# Altium schematic symbol library MyLibrary.SCHLIB: 89 symbols (part 1 of 3)
Pins are listed as number, name and electrical type; pins without a type are passive.

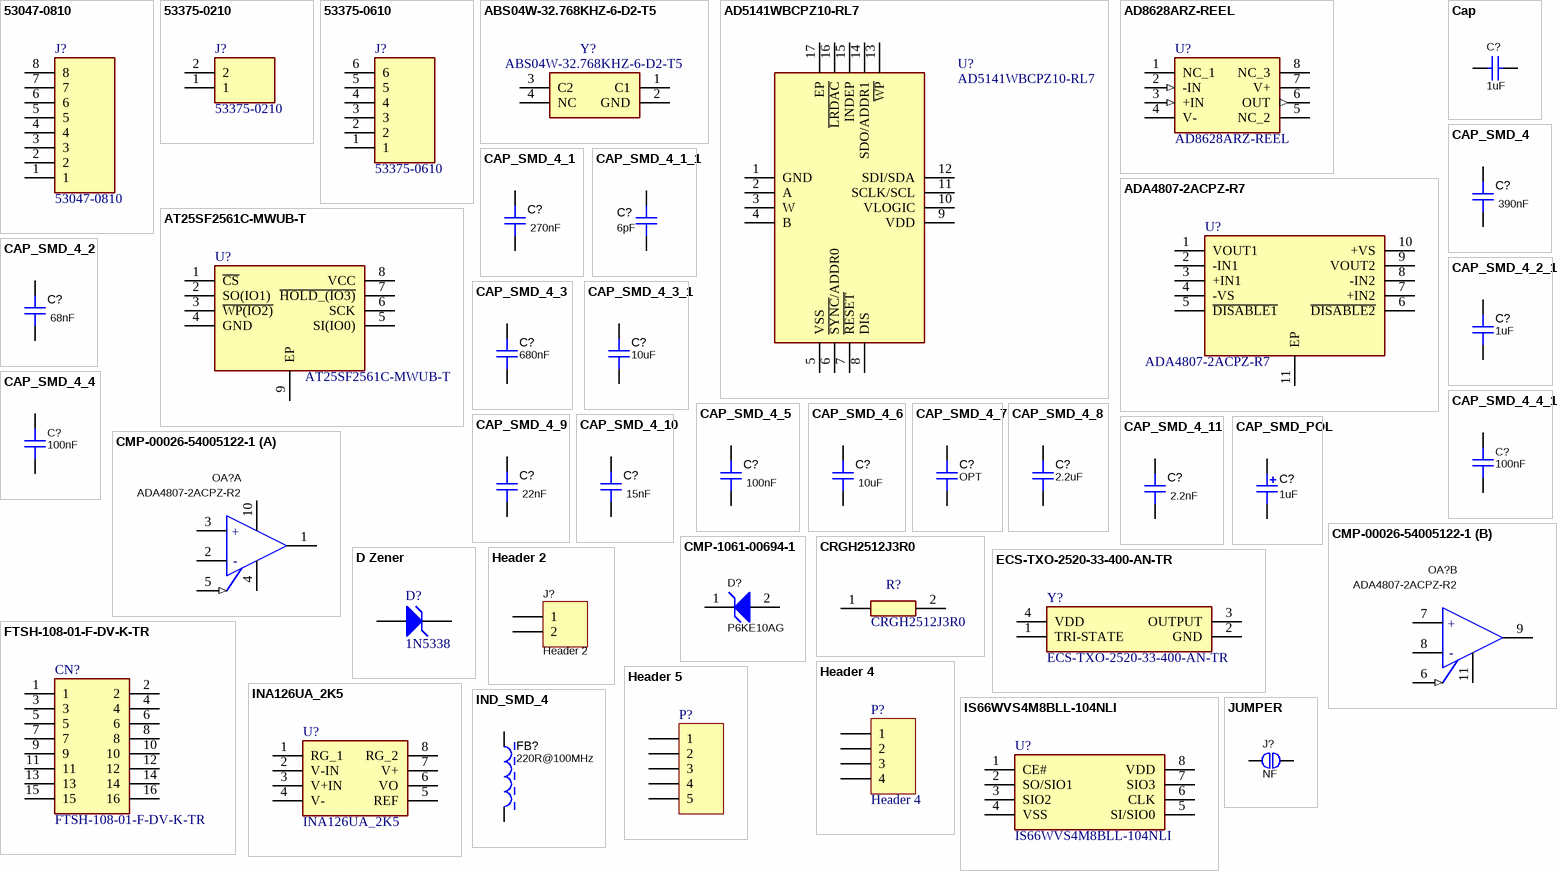
[diagram p0: symbols 53047-0810 to JUMPER]

## 53047-0810
designator J?
Connector; Manufacturer_Name: Molex; Datasheet Link: https://www.mouser.lu/datasheet/2/276/0530470810_PCB_HEADERS-170988.pdf; Height: 4.4mm; Manufacturer_Part_Number: 53047-0810; Mouser Part Number: 538-53047-0810; Mouser Price/Stock: https://www.mouser.co.uk/ProductDetail/Molex/53047-0810?qs=yVuyZxZd%2FtwixHNjj7O2xA%3D%3D
footprint 530470810
pins: 1, 2, 3, 4, 5, 6, 7, 8

## 53375-0210
designator J?
Connector; Manufacturer_Name: Molex; Datasheet Link: https://datasheet.datasheetarchive.com/originals/distributors/Datasheets_SAMA/bd59b54c805ced1a71062f6d650f6341.pdf; Manufacturer_Part_Number: 53375-0210; Mouser Part Number: 538-53375-0210; Mouser Price/Stock: https://www.mouser.co.uk/ProductDetail/Molex/53375-0210?qs=HP07ajSgg77sAYvtVhUSZg%3D%3D
footprint 53375-0210
pins: 1, 2

## 53375-0610
designator J?
Connector; Manufacturer_Name: Molex; Datasheet Link: http://www.molex.com/webdocs/datasheets/pdf/en-us//0533750610_PCB_HEADERS.pdf; Manufacturer_Part_Number: 53375-0610; Mouser Part Number: 538-53375-0610; Mouser Price/Stock: https://www.mouser.co.uk/ProductDetail/Molex/53375-0610?qs=3DzawVMofg%252BMF244WTWp8Q%3D%3D
footprint 53375-0610
pins: 1, 2, 3, 4, 5, 6

## ABS04W-32.768KHZ-6-D2-T5
designator Y?
Crystal or Oscillator; Manufacturer_Name: ABRACON; Datasheet Link: https://abracon.com/datasheets/ABS04W.pdf; Height: 0.35mm; Manufacturer_Part_Number: ABS04W-32.768KHZ-6-D2-T5; Mouser Part Number: 815-04W-32.768-6-D2T; Mouser Price/Stock: https://www.mouser.co.uk/ProductDetail/ABRACON/ABS04W-32.768KHZ-6-D2-T5?qs=lc2O%252BfHJPVZbxXtU7CitfQ%3D%3D; Arrow Part Number: ABS04W-32.768KHZ-6-D2-T5; Arrow Price/Stock: https://www.arrow.com/en/products/abs04w-32.768khz-6-d2-t5/abracon?region=nac
footprint ABS04W32768KHZ6D2T5
pins: 1 C1, 2 GND, 3 C2, 4 NC

## AD5141WBCPZ10-RL7
designator U?
Integrated Circuit; Manufacturer_Name: Analog Devices; Datasheet Link: https://www.analog.com/AD5141/datasheet; Height: 0.8mm; Manufacturer_Part_Number: AD5141WBCPZ10-RL7; Mouser Part Number: 584-AD5141WBCPZ10RL7; Mouser Price/Stock: https://www.mouser.co.uk/ProductDetail/Analog-Devices/AD5141WBCPZ10-RL7?qs=gt1LBUVyoHm1H52beii%2F4w%3D%3D; Arrow Part Number: AD5141WBCPZ10-RL7; Arrow Price/Stock: null?region=nac
footprint QFN50P300X300X80-17N-D
pins: 1 GND, 2 A, 3 W, 4 B, 5 VSS, 6 ~{SYNC}/ADDR0, 7 ~{RESET}, 8 DIS, 9 VDD, 10 VLOGIC, 11 SCLK/SCL, 12 SDI/SDA, 13 ~{WP}, 14 SDO/ADDR1, 15 INDEP, 16 ~{LRDAC}, 17 EP

## AD8628ARZ-REEL
designator U?
Integrated Circuit; Manufacturer_Name: Analog Devices; Datasheet Link: http://www.analog.com/media/en/technical-documentation/data-sheets/AD8628_8629_8630.pdf; Height: 1.75mm; Manufacturer_Part_Number: AD8628ARZ-REEL; Mouser Part Number: 584-AD8628ARZ-R; Mouser Price/Stock: https://www.mouser.co.uk/ProductDetail/Analog-Devices/AD8628ARZ-REEL?qs=%2FtpEQrCGXCzyQnz5nEY4Rg%3D%3D; Arrow Part Number: AD8628ARZ-REEL; Arrow Price/Stock: https://www.arrow.com/en/products/ad8628arz-reel/analog-devices?region=nac
footprint SOIC127P600X175-8N
pins: 1 NC_1, 2 -IN (in), 3 +IN (in), 4 V-, 5 NC_2, 6 OUT (out), 7 V+, 8 NC_3

## ADA4807-2ACPZ-R7
designator U?
Integrated Circuit; Manufacturer_Name: Analog Devices; Datasheet Link: http://www.analog.com/media/en/technical-documentation/data-sheets/ADA4807-1_4807-2_4807-4.pdf; Height: 0.8mm; Manufacturer_Part_Number: ADA4807-2ACPZ-R7; Mouser Part Number: 584-ADA4807-2ACPZ-R7; Mouser Price/Stock: https://www.mouser.co.uk/ProductDetail/Analog-Devices/ADA4807-2ACPZ-R7?qs=pDCvJ8VTjveD%2FcRkuOWedw%3D%3D; Arrow Part Number: ADA4807-2ACPZ-R7; Arrow Price/Stock: https://www.arrow.com/en/products/ada4807-2acpz-r7/analog-devices?utm_currency=USD&region=nac
footprint SON50P300X300X80-11N-D
pins: 1 VOUT1, 2 -IN1, 3 +IN1, 4 -VS, 5 ~{DISABLE1}, 6 ~{DISABLE2}, 7 +IN2, 8 -IN2, 9 VOUT2, 10 +VS, 11 EP

## AT25SF2561C-MWUB-T
designator U?
Integrated Circuit; Manufacturer_Name: Renesas Electronics; Datasheet Link: https://www.renesas.com/us/en/products/memory-logic/non-volatile-memory/spi-nor-flash/at25sf2561c-256mbit-3v-spi-serial-flash-memory-single-dual-quad-io-qpi-and-dtr-support; Height: 0.8mm; Manufacturer_Part_Number: AT25SF2561C-MWUB-T
footprint SON127P800X600X80-9N-D
pins: 1 ~{CS}, 2 SO(IO1), 3 ~{WP(IO2)}, 4 GND, 5 SI(IO0), 6 SCK, 7 ~{HOLD_(IO3)}, 8 VCC, 9 EP

## Cap
designator C?, comment 1uF
Capacitor SMD 1005mm (0402mil) 1uF 50V 10% X5R; Manufacturer 1: Murata; Manufacturer Part Number 1: GRM155R61H105KE05D; Point: U?_PIN?_PIN?; Power Supply Line: 3V3; Dielectric Material: Ceramic; Value: 1uF; Capacitance: 1uF; Category: Capacitor; ComponentLink1Description: Manufacturer 1 Product Page; ComponentLink1URL: https://www.murata.com/en-us/products/productdetail?partno=GRM155R61H105KE05%23; ComponentLink2Description: Manufacturer 1 Product Datasheet 1; ComponentLink2URL: https://www.murata.com/en-us/api/pdfdownloadapi?cate=luCeramicCapacitorsSMD&partno=GRM155R61H105KE05%23; ComponentLink3Description: Supplier 1 Product Page; ComponentLink3URL: https://www.mouser.com/ProductDetail/Murata-Electronics/GRM155R61H105KE05D?qs=sGAEpiMZZMvsSlwiRhF8qtsGU%2FCnaNeQmZAWh6IJQQpqK6b7Qpvy8Q%3D%3D&_gl=1*1tvwjb5*_ga*NDA1NjcxNTEzLjE2NzMzMjM1MDc.*_ga_15W4STQT4T*MTY5MzY4NDY0OC43LjEuMTY5MzY4NjQwNy4wLjAuMA..*_ga_1KQLCYKRX3*MTY5MzY4NDY0OC44LjEuMTY5MzY4NjQwNy41Mi4wLjA.; ComponentLink4Description: Supplier 1 Product Datasheet 1; ComponentLink4URL: https://www.mouser.com/datasheet/2/281/1/GRM155R61H105KE05_01A-1983895.pdf; Manufacturer 1 Product Datasheet 1: https://www.murata.com/en-us/api/pdfdownloadapi?cate=luCeramicCapacitorsSMD&partno=GRM155R61H105KE05%23; Manufacturer 1 Product Page: https://www.murata.com/en-us/products/productdetail?partno=GRM155R61H105KE05%23; Manufacturer: Murata; Manufacturer Part Number: GRM155R61H105KE05D; Manufacturer Product Datasheet: https://www.murata.com/en-us/api/pdfdownloadapi?cate=luCeramicCapacitorsSMD&partno=GRM155R61H105KE05%23; Manufacturer Product Page: https://www.murata.com/en-us/products/productdetail?partno=GRM155R61H105KE05%23; Dielectric: X5R; Supplier 1: Mouser; Supplier Part Number 1: 81-GRM155R61H105KE5D; Description PT-BR: Description PT-BR
footprint 0603 (Chip Inductor, Body 0.6x0.3mm, IPC High Density)
simulation model CAP (Capacitor)
signal-integrity model Cap
footprint 6-0805_L (Chip Resistor, Body 2.0x1.2mm, IPC High Density)
footprint CAPC1608N
footprint CAPC1005N
pins: 1, 2

## CAP_SMD_4
designator C?, comment value 390nF  (hidden comment: 390 nF 5%)
Point: U?_PIN?_PIN?; AAAA_DESCRIPTION: k; Category: Capacitor; Height: k; ComponentLink1Description: Manufacturer 1 Product Page; ComponentLink2Description: Manufacturer 1 Product Datasheet 1; ComponentLink3Description: Supplier 1 Product Page; ComponentLink4Description: Supplier 1 Product Datasheet 1; Supplier 1: Mouser; Capacitance: 390nF; Termination: SMD/SMT; Supplier 2: Mouser; BBBB_LINK: k; ComponentLink5Description: Manufacturer 2 Product Page; ComponentLink6Description: Manufacturer 2 Product Datasheet 1; ComponentLink7Description: Supplier 2 Product Page; ComponentLink8Description: Supplier 2 Product Datasheet 1; Description - Layout: k; Description - Manufacturer: k; Description - Schematic: k; Description - Short: k; Manufacturer 1 Product Datasheet 1: https://www.murata.com/en-us/api/pdfdownloadapi?cate=luCeramicCapacitorsSMD&partno=GCM155R71H104KE02%23; Manufacturer 1 Product Page: https://www.murata.com/en-us/products/productdetail?partno=GCM155R71H104KE02%23; Manufacturer 2 Product Datasheet 1: https://product.tdk.com/system/files/dam/doc/product/capacitor/ceramic/mlcc/catalog/mlcc_automotive_general_en.pdf; Manufacturer 2 Product Page: https://product.tdk.com/en/search/capacitor/ceramic/mlcc/info?part_no=CGA2B3X7R1H104K050BB; Manufacturer Product Datasheet: https://www.murata.com/en-us/api/pdfdownloadapi?cate=luCeramicCapacitorsSMD&partno=GCM155R71H104KE02%23; Manufacturer Product Page: https://www.murata.com/en-us/products/productdetail?partno=GCM155R71H104KE02%23
simulation model CAP (Semiconductor Capacitor)
signal-integrity model Cap Semi
footprint CAPC1608M (Chip Capacitor, Body 1.6x0.8mm, IPC Low Density)
footprint CAPC1005M (Chip Capacitor, Body 1.0x0.5mm, IPC Low Density)
footprint CAPC1210M (Chip Capacitor, Body 1.2x1.0mm, IPC Low Density)
footprint CAPC2012M (Chip Capacitor, Body 2.0x1.3mm, IPC Low Density)
footprint CAPC3216M (Chip Capacitor, Body 3.2x1.6mm, IPC Low Density)
footprint CAPC3225M (Chip Capacitor, Body 3.2x2.5mm, IPC Low Density)
footprint CAPC4532M (Chip Capacitor, Body 4.5x3.2mm, IPC Low Density)
footprint CAPC4564M (Chip Capacitor, Body 4.5x6.4mm, IPC Low Density)
footprint CAPC5750M (Chip Capacitor, Body 5.7x5.0mm, IPC Low Density)
footprint CAPC1005N (Chip Capacitor, Body 1.0x0.5mm, IPC Medium Density)
footprint CAPCS6153X37 (Chip Capacitor Stacked, Body 6.1 x 5.3 mm (LxW typ) 3.7mm max.)
pins: 1, 2

## CAP_SMD_4_1
designator C?, comment value 270nF  (hidden comment: 270 nF 5%)
Point: U?_PIN?_PIN?; AAAA_DESCRIPTION: k; Category: Capacitor; Height: k; ComponentLink1Description: Manufacturer 1 Product Page; ComponentLink2Description: Manufacturer 1 Product Datasheet 1; ComponentLink3Description: Supplier 1 Product Page; ComponentLink4Description: Supplier 1 Product Datasheet 1; Supplier 1: Mouser; Capacitance: 270nF; Termination: SMD/SMT; Supplier 2: Mouser; BBBB_LINK: k; ComponentLink5Description: Manufacturer 2 Product Page; ComponentLink6Description: Manufacturer 2 Product Datasheet 1; ComponentLink7Description: Supplier 2 Product Page; ComponentLink8Description: Supplier 2 Product Datasheet 1; Description - Layout: k; Description - Manufacturer: k; Description - Schematic: k; Description - Short: k; Manufacturer 1 Product Datasheet 1: https://www.murata.com/en-us/api/pdfdownloadapi?cate=luCeramicCapacitorsSMD&partno=GCM155R71H104KE02%23; Manufacturer 1 Product Page: https://www.murata.com/en-us/products/productdetail?partno=GCM155R71H104KE02%23; Manufacturer 2 Product Datasheet 1: https://product.tdk.com/system/files/dam/doc/product/capacitor/ceramic/mlcc/catalog/mlcc_automotive_general_en.pdf; Manufacturer 2 Product Page: https://product.tdk.com/en/search/capacitor/ceramic/mlcc/info?part_no=CGA2B3X7R1H104K050BB; Manufacturer Product Datasheet: https://www.murata.com/en-us/api/pdfdownloadapi?cate=luCeramicCapacitorsSMD&partno=GCM155R71H104KE02%23; Manufacturer Product Page: https://www.murata.com/en-us/products/productdetail?partno=GCM155R71H104KE02%23
simulation model CAP (Semiconductor Capacitor)
signal-integrity model Cap Semi
footprint CAPC1608M (Chip Capacitor, Body 1.6x0.8mm, IPC Low Density)
footprint CAPC1005M (Chip Capacitor, Body 1.0x0.5mm, IPC Low Density)
footprint CAPC1210M (Chip Capacitor, Body 1.2x1.0mm, IPC Low Density)
footprint CAPC2012M (Chip Capacitor, Body 2.0x1.3mm, IPC Low Density)
footprint CAPC3216M (Chip Capacitor, Body 3.2x1.6mm, IPC Low Density)
footprint CAPC3225M (Chip Capacitor, Body 3.2x2.5mm, IPC Low Density)
footprint CAPC4532M (Chip Capacitor, Body 4.5x3.2mm, IPC Low Density)
footprint CAPC4564M (Chip Capacitor, Body 4.5x6.4mm, IPC Low Density)
footprint CAPC5750M (Chip Capacitor, Body 5.7x5.0mm, IPC Low Density)
footprint CAPC1005N (Chip Capacitor, Body 1.0x0.5mm, IPC Medium Density)
footprint CAPCS6153X37 (Chip Capacitor Stacked, Body 6.1 x 5.3 mm (LxW typ) 3.7mm max.)
pins: 1, 2

## CAP_SMD_4_1_1
designator C?, comment value 6pF  (hidden comment: Capacitor SMD 1005mm (0402mil) 6pF 50V 0.5pF C0G)
Manufacturer: Murata; Manufacturer Part Number: GCM1555C1H6R0DA16D; Point: U?_PIN?_PIN?; Description - Short: k; Dielectric Material: Ceramic; Category: Capacitor; Height: k; ComponentLink1Description: Manufacturer 1 Product Page; ComponentLink1URL: k; ComponentLink2Description: Manufacturer 1 Product Datasheet 1; ComponentLink2URL: k; ComponentLink3Description: Supplier 1 Product Page; ComponentLink3URL: k; ComponentLink4Description: Supplier 1 Product Datasheet 1; ComponentLink4URL: k; AAAA_DESCRIPTION: K; BBBB_LINK: K; Description - Layout: k; Description - Schematic: k; Manufacturer Product Datasheet: k; Manufacturer Product Page: k; Description - Manufacturer: k; Manufacturer 1 Product Datasheet 1: k; Manufacturer 1 Product Page: k; Manufacturer 2 Product Datasheet 1: k; Manufacturer 2 Product Page: k; Supplier 1: Mouser; Supplier Part Number 1: 81-GCM1555C1H6R0DA6D; Manufacturer 1: Murata; Manufacturer Part Number 1: GCM1555C1H6R0DA16D; Case Code (Imperial): 0402; Case Code (Metric): 1005; Min Operating Temperature: -55°C; Max Operating Temperature: 125°C; Capacitance: 6pF; Dielectric: C0G; Voltage Rating (DC): 50V; Termination: SMD/SMT; Tolerance: 0.5 pF; ComponentLink5URL: k; ComponentLink5Description: Manufacturer 2 Product Page; ComponentLink6URL: k; ComponentLink6Description: Manufacturer 2 Product Datasheet 1; ComponentLink7URL: k; ComponentLink7Description: Supplier 2 Product Page; ComponentLink8URL: k; ComponentLink8Description: Supplier 2 Product Datasheet 1; Manufacturer 2: k; Manufacturer Part Number 2: k; Supplier 2: k; Supplier Part Number 2: k
simulation model CAP (Semiconductor Capacitor)
signal-integrity model Cap Semi
footprint CAPC1608M (Chip Capacitor, Body 1.6x0.8mm, IPC Low Density)
footprint CAPC1005M (Chip Capacitor, Body 1.0x0.5mm, IPC Low Density)
footprint CAPC1210M (Chip Capacitor, Body 1.2x1.0mm, IPC Low Density)
footprint CAPC2012M (Chip Capacitor, Body 2.0x1.3mm, IPC Low Density)
footprint CAPC3216M (Chip Capacitor, Body 3.2x1.6mm, IPC Low Density)
footprint CAPC3225M (Chip Capacitor, Body 3.2x2.5mm, IPC Low Density)
footprint CAPC4532M (Chip Capacitor, Body 4.5x3.2mm, IPC Low Density)
footprint CAPC4564M (Chip Capacitor, Body 4.5x6.4mm, IPC Low Density)
footprint CAPC5750M (Chip Capacitor, Body 5.7x5.0mm, IPC Low Density)
footprint CAPC1005N (Chip Capacitor, Body 1.0x0.5mm, IPC Medium Density)
footprint CAPCS6153X37 (Chip Capacitor Stacked, Body 6.1 x 5.3 mm (LxW typ) 3.7mm max.)
pins: 1, 2

## CAP_SMD_4_2
designator C?, comment value 68nF  (hidden comment: 68 nF 5%)
Point: U?_PIN?_PIN?; AAAA_DESCRIPTION: k; Category: Capacitor; Height: k; ComponentLink1Description: Manufacturer 1 Product Page; ComponentLink2Description: Manufacturer 1 Product Datasheet 1; ComponentLink3Description: Supplier 1 Product Page; ComponentLink4Description: Supplier 1 Product Datasheet 1; Supplier 1: Mouser; Capacitance: 68nF; Termination: SMD/SMT; Supplier 2: Mouser; BBBB_LINK: k; ComponentLink5Description: Manufacturer 2 Product Page; ComponentLink6Description: Manufacturer 2 Product Datasheet 1; ComponentLink7Description: Supplier 2 Product Page; ComponentLink8Description: Supplier 2 Product Datasheet 1; Description - Layout: k; Description - Manufacturer: k; Description - Schematic: k; Description - Short: k; Manufacturer 1 Product Datasheet 1: https://www.murata.com/en-us/api/pdfdownloadapi?cate=luCeramicCapacitorsSMD&partno=GCM155R71H104KE02%23; Manufacturer 1 Product Page: https://www.murata.com/en-us/products/productdetail?partno=GCM155R71H104KE02%23; Manufacturer 2 Product Datasheet 1: https://product.tdk.com/system/files/dam/doc/product/capacitor/ceramic/mlcc/catalog/mlcc_automotive_general_en.pdf; Manufacturer 2 Product Page: https://product.tdk.com/en/search/capacitor/ceramic/mlcc/info?part_no=CGA2B3X7R1H104K050BB; Manufacturer Product Datasheet: https://www.murata.com/en-us/api/pdfdownloadapi?cate=luCeramicCapacitorsSMD&partno=GCM155R71H104KE02%23; Manufacturer Product Page: https://www.murata.com/en-us/products/productdetail?partno=GCM155R71H104KE02%23
simulation model CAP (Semiconductor Capacitor)
signal-integrity model Cap Semi
footprint CAPC1608M (Chip Capacitor, Body 1.6x0.8mm, IPC Low Density)
footprint CAPC1005M (Chip Capacitor, Body 1.0x0.5mm, IPC Low Density)
footprint CAPC1210M (Chip Capacitor, Body 1.2x1.0mm, IPC Low Density)
footprint CAPC2012M (Chip Capacitor, Body 2.0x1.3mm, IPC Low Density)
footprint CAPC3216M (Chip Capacitor, Body 3.2x1.6mm, IPC Low Density)
footprint CAPC3225M (Chip Capacitor, Body 3.2x2.5mm, IPC Low Density)
footprint CAPC4532M (Chip Capacitor, Body 4.5x3.2mm, IPC Low Density)
footprint CAPC4564M (Chip Capacitor, Body 4.5x6.4mm, IPC Low Density)
footprint CAPC5750M (Chip Capacitor, Body 5.7x5.0mm, IPC Low Density)
footprint CAPC1005N (Chip Capacitor, Body 1.0x0.5mm, IPC Medium Density)
footprint CAPCS6153X37 (Chip Capacitor Stacked, Body 6.1 x 5.3 mm (LxW typ) 3.7mm max.)
pins: 1, 2

## CAP_SMD_4_2_1
designator C?, comment value 1uF  (hidden comment: Capacitor SMD 1608mm (0603mil) 1uF 50V 10% X7R)
Manufacturer: KYOCERA AVX; Manufacturer Part Number: 06035C105KAT2A; Point: U?_PIN?_PIN?; Description - Short: k; Dielectric Material: Ceramic; Category: Capacitor; Height: k; ComponentLink1Description: Manufacturer 1 Product Page; ComponentLink1URL: k; ComponentLink2Description: Manufacturer 1 Product Datasheet 1; ComponentLink2URL: k; ComponentLink3Description: Supplier 1 Product Page; ComponentLink3URL: k; ComponentLink4Description: Supplier 1 Product Datasheet 1; ComponentLink4URL: k; AAAA_DESCRIPTION: k; BBBB_LINK: k; Description - Layout: k; Description - Schematic: k; Manufacturer Product Datasheet: k; Manufacturer Product Page: k; Description - Manufacturer: k; Manufacturer 1 Product Datasheet 1: k; Manufacturer 1 Product Page: k; Manufacturer 2 Product Datasheet 1: k; Manufacturer 2 Product Page: k; Supplier 1: Mouser; Supplier Part Number 1: 581-06035C105KAT2A; Manufacturer 1: KYOCERA AVX; Manufacturer Part Number 1: 06035C105KAT2A; Case Code (Metric): 1608; Case Code (Imperial): 0603; Min Operating Temperature: -55°C; Max Operating Temperature: 125°C; Capacitance: 1uF; Voltage Rating (DC): 50V; Manufacturer 2: k; Termination: SMD/SMT; ComponentLink5Description: Manufacturer 2 Product Page; ComponentLink5URL: k; ComponentLink6Description: Manufacturer 2 Product Datasheet 1; ComponentLink6URL: k; ComponentLink7Description: Supplier 2 Product Page; ComponentLink7URL: k; ComponentLink8Description: Supplier 2 Product Datasheet 1; ComponentLink8URL: k; Manufacturer Part Number 2: k; Supplier 2: k; Supplier Part Number 2: k; Tolerance: 10%; Dielectric: X7R
simulation model CAP (Semiconductor Capacitor)
signal-integrity model Cap Semi
footprint CAPC1608M (Chip Capacitor, Body 1.6x0.8mm, IPC Low Density)
footprint CAPC1005M (Chip Capacitor, Body 1.0x0.5mm, IPC Low Density)
footprint CAPC1210M (Chip Capacitor, Body 1.2x1.0mm, IPC Low Density)
footprint CAPC2012M (Chip Capacitor, Body 2.0x1.3mm, IPC Low Density)
footprint CAPC3216M (Chip Capacitor, Body 3.2x1.6mm, IPC Low Density)
footprint CAPC3225M (Chip Capacitor, Body 3.2x2.5mm, IPC Low Density)
footprint CAPC4532M (Chip Capacitor, Body 4.5x3.2mm, IPC Low Density)
footprint CAPC4564M (Chip Capacitor, Body 4.5x6.4mm, IPC Low Density)
footprint CAPC5750M (Chip Capacitor, Body 5.7x5.0mm, IPC Low Density)
footprint CAPC1005N (Chip Capacitor, Body 1.0x0.5mm, IPC Medium Density)
pins: 1, 2

## CAP_SMD_4_3
designator C?, comment value 680nF  (hidden comment: 680 nF 5%)
Point: U?_PIN?_PIN?; AAAA_DESCRIPTION: k; Category: Capacitor; Height: k; ComponentLink1Description: Manufacturer 1 Product Page; ComponentLink2Description: Manufacturer 1 Product Datasheet 1; ComponentLink3Description: Supplier 1 Product Page; ComponentLink4Description: Supplier 1 Product Datasheet 1; Supplier 1: Mouser; Capacitance: 680nF; Termination: SMD/SMT; Supplier 2: Mouser; BBBB_LINK: k; ComponentLink5Description: Manufacturer 2 Product Page; ComponentLink6Description: Manufacturer 2 Product Datasheet 1; ComponentLink7Description: Supplier 2 Product Page; ComponentLink8Description: Supplier 2 Product Datasheet 1; Description - Layout: k; Description - Manufacturer: k; Description - Schematic: k; Description - Short: k; Manufacturer 1 Product Datasheet 1: https://www.murata.com/en-us/api/pdfdownloadapi?cate=luCeramicCapacitorsSMD&partno=GCM155R71H104KE02%23; Manufacturer 1 Product Page: https://www.murata.com/en-us/products/productdetail?partno=GCM155R71H104KE02%23; Manufacturer 2 Product Datasheet 1: https://product.tdk.com/system/files/dam/doc/product/capacitor/ceramic/mlcc/catalog/mlcc_automotive_general_en.pdf; Manufacturer 2 Product Page: https://product.tdk.com/en/search/capacitor/ceramic/mlcc/info?part_no=CGA2B3X7R1H104K050BB; Manufacturer Product Datasheet: https://www.murata.com/en-us/api/pdfdownloadapi?cate=luCeramicCapacitorsSMD&partno=GCM155R71H104KE02%23; Manufacturer Product Page: https://www.murata.com/en-us/products/productdetail?partno=GCM155R71H104KE02%23
simulation model CAP (Semiconductor Capacitor)
signal-integrity model Cap Semi
footprint CAPC1608M (Chip Capacitor, Body 1.6x0.8mm, IPC Low Density)
footprint CAPC1005M (Chip Capacitor, Body 1.0x0.5mm, IPC Low Density)
footprint CAPC1210M (Chip Capacitor, Body 1.2x1.0mm, IPC Low Density)
footprint CAPC2012M (Chip Capacitor, Body 2.0x1.3mm, IPC Low Density)
footprint CAPC3216M (Chip Capacitor, Body 3.2x1.6mm, IPC Low Density)
footprint CAPC3225M (Chip Capacitor, Body 3.2x2.5mm, IPC Low Density)
footprint CAPC4532M (Chip Capacitor, Body 4.5x3.2mm, IPC Low Density)
footprint CAPC4564M (Chip Capacitor, Body 4.5x6.4mm, IPC Low Density)
footprint CAPC5750M (Chip Capacitor, Body 5.7x5.0mm, IPC Low Density)
footprint CAPC1005N (Chip Capacitor, Body 1.0x0.5mm, IPC Medium Density)
footprint CAPCS6153X37 (Chip Capacitor Stacked, Body 6.1 x 5.3 mm (LxW typ) 3.7mm max.)
pins: 1, 2

## CAP_SMD_4_3_1
designator C?, comment value 10uF  (hidden comment: Capacitor SMD 2012mm (0805mil) 10uF 25V 10% X7R)
Manufacturer 1: Murata; Manufacturer Part Number 1: GRM21BZ71E106KE15K; Point: U?_PIN?_PIN?; AAAA_DESCRIPTION: k; Dielectric Material: Ceramic; Category: Capacitor; Height: k; ComponentLink1Description: Manufacturer 1 Product Page; ComponentLink1URL: k; ComponentLink2Description: Manufacturer 1 Product Datasheet 1; ComponentLink2URL: k; ComponentLink3Description: Supplier 1 Product Page; ComponentLink3URL: k; ComponentLink4Description: Supplier 1 Product Datasheet 1; ComponentLink4URL: k; Supplier 1: Mouser; Supplier Part Number 1: 81-GRM21BZ71E106KE5K; Capacitance: 10uF; Manufacturer: Murata; Manufacturer Part Number: GRM21BZ71E106KE15K; BBBB_LINK: k; ComponentLink5Description: Manufacturer 2 Product Page; ComponentLink6Description: Manufacturer 2 Product Datasheet 1; ComponentLink7Description: Supplier 2 Product Page; ComponentLink8Description: Supplier 2 Product Datasheet 1; ComponentLink5URL: k; ComponentLink6URL: k; ComponentLink7URL: k; ComponentLink8URL: k; Case Code (Imperial): 0805; Case Code (Metric): 2012; Description - Layout: k; Description - Manufacturer: k; Description - Schematic: k; Description - Short: k; Dielectric: X7R; Manufacturer 1 Product Datasheet 1: k; Manufacturer 1 Product Page: k; Manufacturer 2: k; Manufacturer 2 Product Datasheet 1: k; Manufacturer 2 Product Page: k; Manufacturer Part Number 2: k; Manufacturer Product Datasheet: k; Manufacturer Product Page: k; Max Operating Temperature: 125°C; Min Operating Temperature: -55°C; Supplier 2: k; Supplier Part Number 2: k; Termination: SMD/SMT; Tolerance: 10%; Voltage Rating (DC): 25V
simulation model CAP (Semiconductor Capacitor)
signal-integrity model Cap Semi
footprint CAPC1608M (Chip Capacitor, Body 1.6x0.8mm, IPC Low Density)
footprint CAPC1005M (Chip Capacitor, Body 1.0x0.5mm, IPC Low Density)
footprint CAPC1210M (Chip Capacitor, Body 1.2x1.0mm, IPC Low Density)
footprint CAPC2012M (Chip Capacitor, Body 2.0x1.3mm, IPC Low Density)
footprint CAPC3216M (Chip Capacitor, Body 3.2x1.6mm, IPC Low Density)
footprint CAPC3225M (Chip Capacitor, Body 3.2x2.5mm, IPC Low Density)
footprint CAPC4532M (Chip Capacitor, Body 4.5x3.2mm, IPC Low Density)
footprint CAPC4564M (Chip Capacitor, Body 4.5x6.4mm, IPC Low Density)
footprint CAPC5750M (Chip Capacitor, Body 5.7x5.0mm, IPC Low Density)
pins: 1, 2

## CAP_SMD_4_4
designator C?, comment value 100nF  (hidden comment: Capacitor SMD 2012mm (0805mil) 100nF 50V 10% X7R)
Manufacturer 1: Murata; Manufacturer Part Number 1: C0805C104K5RAC7411; Manufacturer: Kemet; Point: U?_PIN?_PIN?; AAAA_DESCRIPTION: k; Dielectric Material: Ceramic; Category: Capacitor; Height: k; ComponentLink1Description: Manufacturer 1 Product Page; ComponentLink1URL: k; ComponentLink2Description: Manufacturer 1 Product Datasheet 1; ComponentLink2URL: k; ComponentLink3Description: Supplier 1 Product Page; ComponentLink3URL: k; ComponentLink4Description: Supplier 1 Product Datasheet 1; ComponentLink4URL: k; Supplier 1: Mouser; Supplier Part Number 1: 80-C0805C104K5RACLR; Capacitance: 100nF; Manufacturer Part Number: C0805C104K5RAC7411; BBBB_LINK: k; ComponentLink5Description: Manufacturer 2 Product Page; ComponentLink6Description: Manufacturer 2 Product Datasheet 1; ComponentLink7Description: Supplier 2 Product Page; ComponentLink8Description: Supplier 2 Product Datasheet 1; ComponentLink5URL: k; ComponentLink6URL: k; ComponentLink7URL: k; ComponentLink8URL: k; Case Code (Imperial): 0805; Case Code (Metric): 2012; Description - Layout: k; Description - Manufacturer: k; Description - Schematic: k; Description - Short: k; Dielectric: X7R; Manufacturer 1 Product Datasheet 1: k; Manufacturer 1 Product Page: k; Manufacturer 2: k; Manufacturer 2 Product Datasheet 1: k; Manufacturer 2 Product Page: k; Manufacturer Part Number 2: k; Manufacturer Product Datasheet: k; Manufacturer Product Page: k; Max Operating Temperature: 125°C; Min Operating Temperature: -55°C; Supplier 2: k; Supplier Part Number 2: k; Termination: SMD/SMT; Tolerance: 10%; Voltage Rating (DC): 50V
simulation model CAP (Semiconductor Capacitor)
signal-integrity model Cap Semi
footprint CAPC1005N (Chip Capacitor, Body 1.0x0.5mm, IPC Medium Density)
pins: 1, 2

## CAP_SMD_4_4_1
designator C?, comment value 100nF  (hidden comment: Capacitor SMD 2012mm (0805mil) 100nF 50V 10% X7R)
Manufacturer 1: Murata; Manufacturer Part Number 1: C0805C104K5RAC7411; Manufacturer: Kemet; Point: U?_PIN?_PIN?; AAAA_DESCRIPTION: k; Dielectric Material: Ceramic; Category: Capacitor; Height: k; ComponentLink1Description: Manufacturer 1 Product Page; ComponentLink1URL: k; ComponentLink2Description: Manufacturer 1 Product Datasheet 1; ComponentLink2URL: k; ComponentLink3Description: Supplier 1 Product Page; ComponentLink3URL: k; ComponentLink4Description: Supplier 1 Product Datasheet 1; ComponentLink4URL: k; Supplier 1: Mouser; Supplier Part Number 1: 80-C0805C104K5RACLR; Capacitance: 100nF; Manufacturer Part Number: C0805C104K5RAC7411; BBBB_LINK: k; ComponentLink5Description: Manufacturer 2 Product Page; ComponentLink6Description: Manufacturer 2 Product Datasheet 1; ComponentLink7Description: Supplier 2 Product Page; ComponentLink8Description: Supplier 2 Product Datasheet 1; ComponentLink5URL: k; ComponentLink6URL: k; ComponentLink7URL: k; ComponentLink8URL: k; Case Code (Imperial): 0805; Case Code (Metric): 2012; Description - Layout: k; Description - Manufacturer: k; Description - Schematic: k; Description - Short: k; Dielectric: X7R; Manufacturer 1 Product Datasheet 1: k; Manufacturer 1 Product Page: k; Manufacturer 2: k; Manufacturer 2 Product Datasheet 1: k; Manufacturer 2 Product Page: k; Manufacturer Part Number 2: k; Manufacturer Product Datasheet: k; Manufacturer Product Page: k; Max Operating Temperature: 125°C; Min Operating Temperature: -55°C; Supplier 2: k; Supplier Part Number 2: k; Termination: SMD/SMT; Tolerance: 10%; Voltage Rating (DC): 50V
simulation model CAP (Semiconductor Capacitor)
signal-integrity model Cap Semi
footprint CAPC1005N (Chip Capacitor, Body 1.0x0.5mm, IPC Medium Density)
pins: 1, 2

## CAP_SMD_4_5
designator C?, comment value 100nF  (hidden comment: Capacitor SMD 1005mm (0402mil) 100nF 50V 10% X7R)
Category: Capacitor; Capacitance: 100nF
simulation model CAP (Semiconductor Capacitor)
signal-integrity model Cap Semi
footprint CAPC1608M (Chip Capacitor, Body 1.6x0.8mm, IPC Low Density)
footprint CAPC1005M (Chip Capacitor, Body 1.0x0.5mm, IPC Low Density)
footprint CAPC1210M (Chip Capacitor, Body 1.2x1.0mm, IPC Low Density)
footprint CAPC2012M (Chip Capacitor, Body 2.0x1.3mm, IPC Low Density)
footprint CAPC3216M (Chip Capacitor, Body 3.2x1.6mm, IPC Low Density)
footprint CAPC3225M (Chip Capacitor, Body 3.2x2.5mm, IPC Low Density)
footprint CAPC4532M (Chip Capacitor, Body 4.5x3.2mm, IPC Low Density)
footprint CAPC4564M (Chip Capacitor, Body 4.5x6.4mm, IPC Low Density)
footprint CAPC5750M (Chip Capacitor, Body 5.7x5.0mm, IPC Low Density)
footprint CAPC1005N (Chip Capacitor, Body 1.0x0.5mm, IPC Medium Density)
footprint CAPCS6153X37 (Chip Capacitor Stacked, Body 6.1 x 5.3 mm (LxW typ) 3.7mm max.)
pins: 1, 2

## CAP_SMD_4_6
designator C?  value 10uF
Point: U?_PIN?_PIN?; AAAA_DESCRIPTION: k; Category: Capacitor; Height: k; ComponentLink1Description: Manufacturer 1 Product Page; ComponentLink2Description: Manufacturer 1 Product Datasheet 1; ComponentLink3Description: Supplier 1 Product Page; ComponentLink4Description: Supplier 1 Product Datasheet 1; Supplier 1: Mouser; Capacitance: 10uF; Termination: SMD/SMT; Supplier 2: Mouser; BBBB_LINK: k; ComponentLink5Description: Manufacturer 2 Product Page; ComponentLink6Description: Manufacturer 2 Product Datasheet 1; ComponentLink7Description: Supplier 2 Product Page; ComponentLink8Description: Supplier 2 Product Datasheet 1; Description - Layout: k; Description - Manufacturer: k; Description - Schematic: k; Description - Short: k; Manufacturer 1 Product Datasheet 1: https://www.murata.com/en-us/api/pdfdownloadapi?cate=luCeramicCapacitorsSMD&partno=GCM155R71H104KE02%23; Manufacturer 1 Product Page: https://www.murata.com/en-us/products/productdetail?partno=GCM155R71H104KE02%23; Manufacturer 2 Product Datasheet 1: https://product.tdk.com/system/files/dam/doc/product/capacitor/ceramic/mlcc/catalog/mlcc_automotive_general_en.pdf; Manufacturer 2 Product Page: https://product.tdk.com/en/search/capacitor/ceramic/mlcc/info?part_no=CGA2B3X7R1H104K050BB; Manufacturer Product Datasheet: https://www.murata.com/en-us/api/pdfdownloadapi?cate=luCeramicCapacitorsSMD&partno=GCM155R71H104KE02%23; Manufacturer Product Page: https://www.murata.com/en-us/products/productdetail?partno=GCM155R71H104KE02%23
simulation model CAP (Semiconductor Capacitor)
signal-integrity model Cap Semi
footprint CAPC1608M (Chip Capacitor, Body 1.6x0.8mm, IPC Low Density)
footprint CAPC1005M (Chip Capacitor, Body 1.0x0.5mm, IPC Low Density)
footprint CAPC1210M (Chip Capacitor, Body 1.2x1.0mm, IPC Low Density)
footprint CAPC2012M (Chip Capacitor, Body 2.0x1.3mm, IPC Low Density)
footprint CAPC3216M (Chip Capacitor, Body 3.2x1.6mm, IPC Low Density)
footprint CAPC3225M (Chip Capacitor, Body 3.2x2.5mm, IPC Low Density)
footprint CAPC4532M (Chip Capacitor, Body 4.5x3.2mm, IPC Low Density)
footprint CAPC4564M (Chip Capacitor, Body 4.5x6.4mm, IPC Low Density)
footprint CAPC5750M (Chip Capacitor, Body 5.7x5.0mm, IPC Low Density)
footprint CAPC1005N (Chip Capacitor, Body 1.0x0.5mm, IPC Medium Density)
footprint CAPCS6153X37 (Chip Capacitor Stacked, Body 6.1 x 5.3 mm (LxW typ) 3.7mm max.)
pins: 1, 2

## CAP_SMD_4_7
designator C?  value OPT
Capacitance: 220pF
simulation model CAP (Semiconductor Capacitor)
signal-integrity model Cap Semi
footprint CAPC1608M (Chip Capacitor, Body 1.6x0.8mm, IPC Low Density)
footprint CAPC1005M (Chip Capacitor, Body 1.0x0.5mm, IPC Low Density)
footprint CAPC1210M (Chip Capacitor, Body 1.2x1.0mm, IPC Low Density)
footprint CAPC2012M (Chip Capacitor, Body 2.0x1.3mm, IPC Low Density)
footprint CAPC3216M (Chip Capacitor, Body 3.2x1.6mm, IPC Low Density)
footprint CAPC3225M (Chip Capacitor, Body 3.2x2.5mm, IPC Low Density)
footprint CAPC4532M (Chip Capacitor, Body 4.5x3.2mm, IPC Low Density)
footprint CAPC4564M (Chip Capacitor, Body 4.5x6.4mm, IPC Low Density)
footprint CAPC5750M (Chip Capacitor, Body 5.7x5.0mm, IPC Low Density)
footprint CAPC1005N (Chip Capacitor, Body 1.0x0.5mm, IPC Medium Density)
footprint CAPCS6153X37 (Chip Capacitor Stacked, Body 6.1 x 5.3 mm (LxW typ) 3.7mm max.)
pins: 1, 2

## CAP_SMD_4_8
designator C?, comment value 2.2uF  (hidden comment: Capacitor SMD 1005mm (0603mil) 2.2uF 50V 10% X7R)
Category: Capacitor; Capacitance: 2.2uF
simulation model CAP (Semiconductor Capacitor)
signal-integrity model Cap Semi
footprint CAPC1608M (Chip Capacitor, Body 1.6x0.8mm, IPC Low Density)
footprint CAPC1005M (Chip Capacitor, Body 1.0x0.5mm, IPC Low Density)
footprint CAPC1210M (Chip Capacitor, Body 1.2x1.0mm, IPC Low Density)
footprint CAPC2012M (Chip Capacitor, Body 2.0x1.3mm, IPC Low Density)
footprint CAPC3216M (Chip Capacitor, Body 3.2x1.6mm, IPC Low Density)
footprint CAPC3225M (Chip Capacitor, Body 3.2x2.5mm, IPC Low Density)
footprint CAPC4532M (Chip Capacitor, Body 4.5x3.2mm, IPC Low Density)
footprint CAPC4564M (Chip Capacitor, Body 4.5x6.4mm, IPC Low Density)
footprint CAPC5750M (Chip Capacitor, Body 5.7x5.0mm, IPC Low Density)
footprint CAPC1005N (Chip Capacitor, Body 1.0x0.5mm, IPC Medium Density)
footprint CAPCS6153X37 (Chip Capacitor Stacked, Body 6.1 x 5.3 mm (LxW typ) 3.7mm max.)
pins: 1, 2

## CAP_SMD_4_9
designator C?, comment value 22nF  (hidden comment: 22 nF 5%)
Point: U?_PIN?_PIN?; AAAA_DESCRIPTION: k; Category: Capacitor; Height: k; ComponentLink1Description: Manufacturer 1 Product Page; ComponentLink2Description: Manufacturer 1 Product Datasheet 1; ComponentLink3Description: Supplier 1 Product Page; ComponentLink4Description: Supplier 1 Product Datasheet 1; Supplier 1: Mouser; Capacitance: 22nF; Termination: SMD/SMT; Supplier 2: Mouser; BBBB_LINK: k; ComponentLink5Description: Manufacturer 2 Product Page; ComponentLink6Description: Manufacturer 2 Product Datasheet 1; ComponentLink7Description: Supplier 2 Product Page; ComponentLink8Description: Supplier 2 Product Datasheet 1; Description - Layout: k; Description - Manufacturer: k; Description - Schematic: k; Description - Short: k; Manufacturer 1 Product Datasheet 1: https://www.murata.com/en-us/api/pdfdownloadapi?cate=luCeramicCapacitorsSMD&partno=GCM155R71H104KE02%23; Manufacturer 1 Product Page: https://www.murata.com/en-us/products/productdetail?partno=GCM155R71H104KE02%23; Manufacturer 2 Product Datasheet 1: https://product.tdk.com/system/files/dam/doc/product/capacitor/ceramic/mlcc/catalog/mlcc_automotive_general_en.pdf; Manufacturer 2 Product Page: https://product.tdk.com/en/search/capacitor/ceramic/mlcc/info?part_no=CGA2B3X7R1H104K050BB; Manufacturer Product Datasheet: https://www.murata.com/en-us/api/pdfdownloadapi?cate=luCeramicCapacitorsSMD&partno=GCM155R71H104KE02%23; Manufacturer Product Page: https://www.murata.com/en-us/products/productdetail?partno=GCM155R71H104KE02%23
simulation model CAP (Semiconductor Capacitor)
signal-integrity model Cap Semi
footprint CAPC1608M (Chip Capacitor, Body 1.6x0.8mm, IPC Low Density)
footprint CAPC1005M (Chip Capacitor, Body 1.0x0.5mm, IPC Low Density)
footprint CAPC1210M (Chip Capacitor, Body 1.2x1.0mm, IPC Low Density)
footprint CAPC2012M (Chip Capacitor, Body 2.0x1.3mm, IPC Low Density)
footprint CAPC3216M (Chip Capacitor, Body 3.2x1.6mm, IPC Low Density)
footprint CAPC3225M (Chip Capacitor, Body 3.2x2.5mm, IPC Low Density)
footprint CAPC4532M (Chip Capacitor, Body 4.5x3.2mm, IPC Low Density)
footprint CAPC4564M (Chip Capacitor, Body 4.5x6.4mm, IPC Low Density)
footprint CAPC5750M (Chip Capacitor, Body 5.7x5.0mm, IPC Low Density)
footprint CAPC1005N (Chip Capacitor, Body 1.0x0.5mm, IPC Medium Density)
footprint CAPCS6153X37 (Chip Capacitor Stacked, Body 6.1 x 5.3 mm (LxW typ) 3.7mm max.)
pins: 1, 2

## CAP_SMD_4_10
designator C?, comment value 15nF  (hidden comment: 15 nF 5%)
Point: U?_PIN?_PIN?; AAAA_DESCRIPTION: k; Category: Capacitor; Height: k; ComponentLink1Description: Manufacturer 1 Product Page; ComponentLink2Description: Manufacturer 1 Product Datasheet 1; ComponentLink3Description: Supplier 1 Product Page; ComponentLink4Description: Supplier 1 Product Datasheet 1; Supplier 1: Mouser; Capacitance: 15nF; Termination: SMD/SMT; Supplier 2: Mouser; BBBB_LINK: k; ComponentLink5Description: Manufacturer 2 Product Page; ComponentLink6Description: Manufacturer 2 Product Datasheet 1; ComponentLink7Description: Supplier 2 Product Page; ComponentLink8Description: Supplier 2 Product Datasheet 1; Description - Layout: k; Description - Manufacturer: k; Description - Schematic: k; Description - Short: k; Manufacturer 1 Product Datasheet 1: https://www.murata.com/en-us/api/pdfdownloadapi?cate=luCeramicCapacitorsSMD&partno=GCM155R71H104KE02%23; Manufacturer 1 Product Page: https://www.murata.com/en-us/products/productdetail?partno=GCM155R71H104KE02%23; Manufacturer 2 Product Datasheet 1: https://product.tdk.com/system/files/dam/doc/product/capacitor/ceramic/mlcc/catalog/mlcc_automotive_general_en.pdf; Manufacturer 2 Product Page: https://product.tdk.com/en/search/capacitor/ceramic/mlcc/info?part_no=CGA2B3X7R1H104K050BB; Manufacturer Product Datasheet: https://www.murata.com/en-us/api/pdfdownloadapi?cate=luCeramicCapacitorsSMD&partno=GCM155R71H104KE02%23; Manufacturer Product Page: https://www.murata.com/en-us/products/productdetail?partno=GCM155R71H104KE02%23
simulation model CAP (Semiconductor Capacitor)
signal-integrity model Cap Semi
footprint CAPC1608M (Chip Capacitor, Body 1.6x0.8mm, IPC Low Density)
footprint CAPC1005M (Chip Capacitor, Body 1.0x0.5mm, IPC Low Density)
footprint CAPC1210M (Chip Capacitor, Body 1.2x1.0mm, IPC Low Density)
footprint CAPC2012M (Chip Capacitor, Body 2.0x1.3mm, IPC Low Density)
footprint CAPC3216M (Chip Capacitor, Body 3.2x1.6mm, IPC Low Density)
footprint CAPC3225M (Chip Capacitor, Body 3.2x2.5mm, IPC Low Density)
footprint CAPC4532M (Chip Capacitor, Body 4.5x3.2mm, IPC Low Density)
footprint CAPC4564M (Chip Capacitor, Body 4.5x6.4mm, IPC Low Density)
footprint CAPC5750M (Chip Capacitor, Body 5.7x5.0mm, IPC Low Density)
footprint CAPC1005N (Chip Capacitor, Body 1.0x0.5mm, IPC Medium Density)
footprint CAPCS6153X37 (Chip Capacitor Stacked, Body 6.1 x 5.3 mm (LxW typ) 3.7mm max.)
pins: 1, 2

## CAP_SMD_4_11
designator C?, comment value 2.2nF  (hidden comment: 2.2 nF 5%)
Manufacturer: KEMET; Manufacturer Part Number: C0805C222J1GACTU; Point: U?_PIN?_PIN?; AAAA_DESCRIPTION: k; Category: Capacitor; Height: k; ComponentLink1Description: Manufacturer 1 Product Page; ComponentLink2Description: Manufacturer 1 Product Datasheet 1; ComponentLink3Description: Supplier 1 Product Page; ComponentLink4Description: Supplier 1 Product Datasheet 1; Supplier 1: Mouser; Capacitance: 2.2nF; Termination: SMD/SMT; Supplier 2: Mouser; BBBB_LINK: k; ComponentLink5Description: Manufacturer 2 Product Page; ComponentLink6Description: Manufacturer 2 Product Datasheet 1; ComponentLink7Description: Supplier 2 Product Page; ComponentLink8Description: Supplier 2 Product Datasheet 1; Description - Layout: k; Description - Manufacturer: k; Description - Schematic: k; Description - Short: k; Manufacturer 1 Product Datasheet 1: https://www.murata.com/en-us/api/pdfdownloadapi?cate=luCeramicCapacitorsSMD&partno=GCM155R71H104KE02%23; Manufacturer 1 Product Page: https://www.murata.com/en-us/products/productdetail?partno=GCM155R71H104KE02%23; Manufacturer 2 Product Datasheet 1: https://product.tdk.com/system/files/dam/doc/product/capacitor/ceramic/mlcc/catalog/mlcc_automotive_general_en.pdf; Manufacturer 2 Product Page: https://product.tdk.com/en/search/capacitor/ceramic/mlcc/info?part_no=CGA2B3X7R1H104K050BB; Manufacturer Product Datasheet: https://www.murata.com/en-us/api/pdfdownloadapi?cate=luCeramicCapacitorsSMD&partno=GCM155R71H104KE02%23; Manufacturer Product Page: https://www.murata.com/en-us/products/productdetail?partno=GCM155R71H104KE02%23
simulation model CAP (Semiconductor Capacitor)
signal-integrity model Cap Semi
footprint CAPC1608M (Chip Capacitor, Body 1.6x0.8mm, IPC Low Density)
footprint CAPC1005M (Chip Capacitor, Body 1.0x0.5mm, IPC Low Density)
footprint CAPC1210M (Chip Capacitor, Body 1.2x1.0mm, IPC Low Density)
footprint CAPC2012M (Chip Capacitor, Body 2.0x1.3mm, IPC Low Density)
footprint CAPC3216M (Chip Capacitor, Body 3.2x1.6mm, IPC Low Density)
footprint CAPC3225M (Chip Capacitor, Body 3.2x2.5mm, IPC Low Density)
footprint CAPC4532M (Chip Capacitor, Body 4.5x3.2mm, IPC Low Density)
footprint CAPC4564M (Chip Capacitor, Body 4.5x6.4mm, IPC Low Density)
footprint CAPC5750M (Chip Capacitor, Body 5.7x5.0mm, IPC Low Density)
footprint CAPC1005N (Chip Capacitor, Body 1.0x0.5mm, IPC Medium Density)
footprint CAPCS6153X37 (Chip Capacitor Stacked, Body 6.1 x 5.3 mm (LxW typ) 3.7mm max.)
pins: 1, 2

## CAP_SMD_POL
designator C?, comment 1uF
Capacitor SMD 1005mm (0402mil) 1uF 50V 10% X5R; Manufacturer_Name: Kyocera AVX; Manufacturer_Part_Number: TPSB106K016R0500; Manufacturer: Murata; Manufacturer Part Number: GRM155R61H105KE05D; Datasheet Link: https://componentsearchengine.com/Datasheets/2/TPSB106K016R0500.pdf; Height: 2.1mm; Mouser Part Number: 581-TPSB106K016R0500; Mouser Price/Stock: https://www.mouser.co.uk/ProductDetail/KYOCERA-AVX/TPSB106K016R0500?qs=2Zc1E7vIw%252B6V4Ir4qQ11Ew%3D%3D; Arrow Part Number: TPSB106K016R0500; Arrow Price/Stock: https://www.arrow.com/en/products/tpsb106k016r0500/avx?utm_currency=USD&region=nac
footprint CAPC2012M (Chip Capacitor, Body 2.0x1.3mm, IPC Low Density)
pins: 1, 2

## CMP-00026-54005122-1
designator OA?, comment ADA4807-2ACPZ-R2
ADA4807-2ACPZ-R2 ROHS3Compliant e3 ADA4807 Tape & Reel (TR) op amp amplifier circuit 3.1mm 1.6muA 20muV 98dB; Manufacturer Lifecycle Status: PRODUCTION; NexarPartId: 54005122; Bandwidth: 180MHz; Response Time: 47ns; Max Dual Supply Voltage: 5V; Number of Channels: 2; -3db Bandwidth: 170MHz; Max Frequency: 100kHz; Min Input Voltage: 2.7V; Max Supply Voltage: 11V; Nominal Supply Current: 1mA; Output Current: 60mA; Voltage Gain: 130dB; Min Dual Supply Voltage: 1.5V; Input Bias Current: -1.2µA; Operating Supply Current: 950µA; Output Current per Channel: 80mA; Input Offset Voltage (Vos): 140µV; Common Mode Rejection Ratio: 110dB; Number of Pins: 10; Min Operating Temperature: -40°C; Lead Free: Contains Lead; Lifecycle Status: Production; Height: 800µm; Schedule B: 8542330000, 8542330000; Length: 3.1mm; Number of Amplifiers: 2; Number of Circuits: 2; Packaging: Tape & Reel; Mount: Surface Mount; Min Supply Voltage: 2.7V; Contact Plating: Tin; Max Input Voltage: 11V; REACH SVHC: No SVHC; Width: 3.1mm; Max Operating Temperature: 125°C; Power Supply Rejection Ratio (PSRR): 98dB; RoHS: Compliant; Gain Bandwidth Product: 180MHz
footprint FP-CP-10-9-IPC_A (1.2 A, Ultralow Noise, High PSRR, Adjustable Output, RF Linear Regulator)
footprint FP-CP-10-9-IPC_B (1.2 A, Ultralow Noise, High PSRR, Adjustable Output, RF Linear Regulator)
footprint FP-CP-10-9-IPC_C (1.2 A, Ultralow Noise, High PSRR, Adjustable Output, RF Linear Regulator)
part A pins: 1 OUT1, 2 -IN1 (hiz), 3 +IN1 (hiz), 4 -VS (power), 5 ~{DISABLE1} (in), 10 +VS (power)
part B pins: 6 ~{DISABLE2} (in), 7 +IN2 (hiz), 8 -IN2 (hiz), 9 VOUT2, 11 EPAD
part A text: +; -
part B text: +; -

## CMP-1061-00694-1
designator D?, comment P6KE10AG
600 W Peak Power Transient Voltage Suppressor, 2-Pin Surmetic(TM) 40, Pb-Free, Bulk Box; Manufacturer: On Semiconductor; PPK Max (W): 600; V(BR) Typ (V): 10; Direction: Unidirectional; ComponentLink3URL: http://www.onsemi.cn/pub_link/Collateral/017AA.PDF; ComponentLink2Description: Datasheet; PartNumber: P6KE10AG; ComponentLink1Description: Manufacturer URL; ComponentLink2URL: http://www.onsemi.com/pub_link/Collateral/P6KE6.8A-D.PDF; ComponentLink1URL: http://www.onsemi.com/; IR Max (uA): 10; PackageVersion: Rev. O, 09/2005; RoHS: Pb-Free; PackageReference: SURMETIC40-2-017AA-01; ComponentLink3Description: Package Specification; DatasheetVersion: Rev. 10; Mounting Technology: Through Hole; Packing: Bulk Box; PackageDescription: 2-Pin, Axial Lead, Diameter 3.49 mm
footprint ONSC-SURMETIC40-2-017AA-01 (AXIAL, 2-Leads, Diameter 3.49mm)
pins: 1 K, 2 A

## CRGH2512J3R0
designator R?
Resistor; Manufacturer_Name: TE Connectivity; Datasheet Link: http://docs-europe.electrocomponents.com/webdocs/12d7/0900766b812d7379.pdf; Height: 0.65mm; Manufacturer_Part_Number: CRGH2512J3R0
footprint RESC6432X65N
pins: 1, 2